# Altium footprint library HIL_project.PcbLib: 26 footprints (part 2 of 2)
Each footprint in its own frame and in the unit in brackets; x right, y up, seen from the top. Pads: shape width x height; smd on the part's side, far side on the other; paste and mask are expansions set on the pad; w line width, h text height; cw(c..) or ccw(c..) is an arc to the next point about the centre after c.
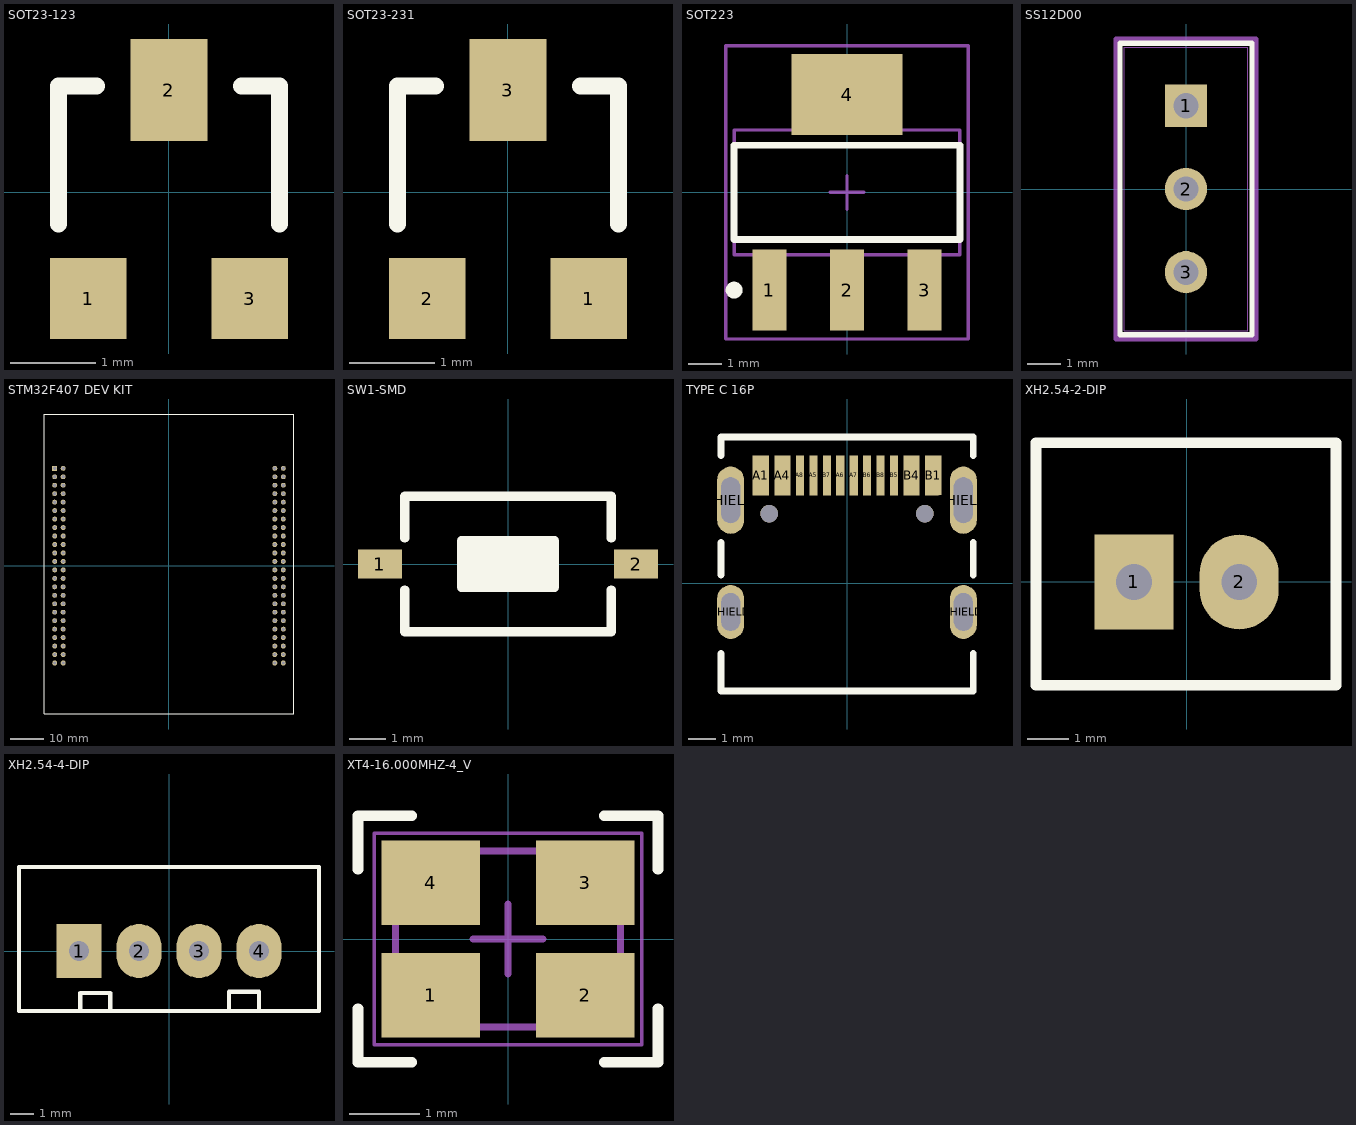
[diagram p1: the footprints below, top view; thin cyan lines are the x and y axes]

## SOT23-123 [mm] "SOT23, 1=bottom-left, 2=top, 3=bottom-right"
height 1.1
pads (3):
  rect 0.9x0.95 smd: 1(-0.95,-1.25) 3(0.95,-1.25)
  rect 0.9x1.2 smd: 2(0,1.2)
Top Overlay:
  lines w0.2: -1.3,-0.375 -1.3,1.25 -0.85,1.25 ; 0.85,1.25 1.3,1.25 1.3,-0.375
3D body "SW3DPS-SOT-23-DEFAULT.STEP": height 1.15, standoff 0.05, extent -1.524,-1.23 1.476,1.27

## SOT23-231 [mm]
height 1.1
pads (3):
  rect 0.9x0.95 smd mask+0: 1(0.95,-1.25)
  rect 0.9x0.95 smd: 2(-0.95,-1.25)
  rect 0.9x1.2 smd: 3(0,1.2)
Top Overlay:
  lines w0.2: -1.3,-0.375 -1.3,1.25 -0.85,1.25 ; 0.85,1.25 1.3,1.25 1.3,-0.375
3D body "SW3DPS-SOT-23-DEFAULT.STEP": height 1.15, standoff 0.05, extent -1.524,-1.23 1.476,1.27

## SOT223 [mm]
pads (4):
  rect 1x2.4 smd: 1(-2.3,-2.9) 2(0,-2.9) 3(2.3,-2.9)
  rect 3.3x2.4 smd: 4(0,2.9)
Top Overlay:
  circle w0.25: c-3.35,-2.9 r0.125
  lines w0.2: -3.35,-1.4 3.35,-1.4 3.35,1.4 -3.35,1.4 -3.35,-1.4
Mechanical 13:
  lines w0.1: -3.35,-1.85 3.35,-1.85 3.35,1.85 -3.35,1.85 -3.35,-1.85
Mechanical 15:
  lines w0.1: -0.5,0 0.5,0 ; 0,-0.5 0,0.5 ; -3.6,-4.35 3.6,-4.35 3.6,4.35 -3.6,4.35 -3.6,-4.35
3D body "SW3DPS-SOT-223-DEFAULT.step": height 1.68, standoff 0, extent -3.25,-3.556 3.25,3.404

## SS12D00 [mil]
pads (3):
  rect 50x50 hole 30 paste-99999 mask+0: 1(0,98.43)
  round 50 hole 30 paste-99999 mask+0: 2(0,0) 3(0,-98.43)
Top Overlay:
  lines w6: -78,-172.5 -78,172.5 78,172.5 78,-172.5 -78,-172.5
Mechanical 13:
  lines w1: -73,-167.5 -73,167.5 73,167.5 73,-167.5 -73,-167.5
Mechanical 15:
  lines w6: -83,-177.5 -83,177.5 83,177.5 83,-177.5 -83,-177.5
3D body "SPDT slide switch SS12D00.step": height 244.52, standoff -135.56, extent -68.9,-167.32 68.9,167.32

## STM32F407 DEV KIT [mm]
pads (96):
  rect 1.478x1.478 hole 0.97: 1(-34.29,29.21)
  round 1.478 hole 0.97: 2(-31.75,29.21) 3(-34.29,26.67) 4(-31.75,26.67) 5(-34.29,24.13) 6(-31.75,24.13) 7(-34.29,21.59) 8(-31.75,21.59) 9(-34.29,19.05) 10(-31.75,19.05) 11(-34.29,16.51) 12(-31.75,16.51) 13(-34.29,13.97) 14(-31.75,13.97) 15(-34.29,11.43) 16(-31.75,11.43) 17(-34.29,8.89) 18(-31.75,8.89) 19(-34.29,6.35) 20(-31.75,6.35) 21(-34.29,3.81) 22(-31.75,3.81) 23(-34.29,1.27) 24(-31.75,1.27) 25(-34.29,-1.27) 26(-31.75,-1.27) 27(-34.29,-3.81) 28(-31.75,-3.81) 29(-34.29,-6.35) 30(-31.75,-6.35) 31(-34.29,-8.89) 32(-31.75,-8.89) 33(-34.29,-11.43) 34(-31.75,-11.43) 35(-34.29,-13.97) 36(-31.75,-13.97) 37(-34.29,-16.51) 38(-31.75,-16.51) 39(-34.29,-19.05) 40(-31.75,-19.05) 41(-34.29,-21.59) 42(-31.75,-21.59) 43(-34.29,-24.13) 44(-31.75,-24.13) 45(-34.29,-26.67) 46(-31.75,-26.67) 47(-34.29,-29.21) 48(-31.75,-29.21) 49(31.75,29.21) 50(34.29,29.21) 51(31.75,26.67) 52(34.29,26.67) 53(31.75,24.13) 54(34.29,24.13) 55(31.75,21.59) 56(34.29,21.59) 57(31.75,19.05) 58(34.29,19.05) 59(31.75,16.51) 60(34.29,16.51) 61(31.75,13.97) 62(34.29,13.97) 63(31.75,11.43) 64(34.29,11.43) 65(31.75,8.89) 66(34.29,8.89) 67(31.75,6.35) 68(34.29,6.35) 69(31.75,3.81) 70(34.29,3.81) 71(31.75,1.27) 72(34.29,1.27) 73(31.75,-1.27) 74(34.29,-1.27) 75(31.75,-3.81) 76(34.29,-3.81) 77(31.75,-6.35) 78(34.29,-6.35) 79(31.75,-8.89) 80(34.29,-8.89) 81(31.75,-11.43) 82(34.29,-11.43) 83(31.75,-13.97) 84(34.29,-13.97) 85(31.75,-16.51) 86(34.29,-16.51) 87(31.75,-19.05) 88(34.29,-19.05) 89(31.75,-21.59) 90(34.29,-21.59) 91(31.75,-24.13) 92(34.29,-24.13) 93(31.75,-26.67) 94(34.29,-26.67) 95(31.75,-29.21) 96(34.29,-29.21)
Top Overlay:
  lines w0.15: -37.5,-44.5 -37.5,45.5 37.5,45.5 37.5,-44.5 -37.5,-44.5
3D body "step_temp.STEP": height 8.51, standoff -3.56, extent 29.97,-30.48 36.07,30.48
3D body "step_temp.STEP": height 8.51, standoff -3.56, extent -36.07,-30.48 -29.97,30.48
3D body "STM32F407ZGT6.STEP": height 14.2, standoff 2, extent -36.25,-42.55 36.25,44.05

## SW1-SMD [mm]
pads (2):
  rect 1.2x0.8 smd: 1(-3.5,0) 2(3.5,0)
Top Overlay:
  rectangle: -1.27,-0.635 1.27,0.635
  lines w0.254: -2.819,-0.711 -2.819,-1.854 2.819,-1.854 2.819,-0.711 ; -2.819,0.711 -2.819,1.854 2.819,1.854 2.819,0.711 ; -1.27,-0.635 -1.27,0.635 1.27,0.635 1.27,-0.635 -1.27,-0.635
3D body "User Library-Button-SMD.step": height 2.5, standoff 0, extent -3.05,-1.85 3.05,1.85

## TYPE C 16P [mm]
pads (18):
  rect 0.6x1.5 smd: A1(-3.202,4) A4(-2.402,4) B1(3.198,4) B4(2.398,4)
  rect 0.3x1.5 smd: A5(-1.252,4) A6(-0.252,4) A7(0.248,4) A8(-1.752,4) B5(1.748,4) B6(0.748,4) B7(-0.752,4) B8(1.248,4)
  oval 1x2 hole 0.7 slot 1.4 at 90 deg: SHIELD(-4.322,-1.067) SHIELD(4.318,-1.067)
  oval 1x2.5 hole 0.7 slot 1.7 at 90 deg: SHIELD(-4.322,3.083) SHIELD(4.318,3.083)
  round 0.65 hole 0.65 mask+0.102: SHIELD(-2.892,2.583) SHIELD(2.888,2.583)
Top Overlay:
  lines w0.254: -4.678,-2.614 -4.678,-4.003 4.688,-4.003 4.688,-2.614 ; -4.678,0.3 -4.678,1.514 ; -4.678,4.746 -4.678,5.43 4.688,5.43 4.688,4.746 ; 4.688,0.3 4.688,1.514
3D body "Type-C 16P.STEP": height 3.21, standoff -1, extent -4.47,-3.65 4.47,4.25

## XH2.54-2-DIP [mil] "CON2"
height 200
pads (2):
  rect 75x90 hole 34: 1(-50,0)
  oval 75x90 hole 34: 2(50,0)
Top Overlay:
  lines w10: -143,-98 -143,132 142,132 142,-98 -143,-98
3D body "JST - XH - Thru V - 2Pin - 2.54mm.stp": height 284, standoff -118, extent -142.39,-98 141.61,132

## XH2.54-4-DIP [mil] "CON4"
height 200
pads (4):
  rect 75x90 hole 34: 1(-150,0)
  oval 75x90 hole 34: 2(-50,0) 3(50,0) 4(150,0)
Top Overlay:
  lines w7: -148,-100 -148,-70 -98,-70 -98,-100 ; 100,-98 100,-68 150,-68 150,-98 ; -250,-100 -250,140 250,140 250,0 250,-100 -250,-100
3D body "User Library-XH2_54-4P_step.step": height 275.59, standoff -70.87, extent -241.97,-90.99 250.16,137.36

## XT4-16.000MHZ-4_V [mm] "Hand Drawn, 4-Leads, Body 3.2x2.5 mm"
height 0.9
pads (4):
  rect 1.4x1.2 smd: 1(-1.1,-0.8) 2(1.1,-0.8) 3(1.1,0.8) 4(-1.1,0.8)
Top Overlay:
  lines w0.15: -2.132,-0.989 -2.132,-1.751 -1.37,-1.751 ; -2.132,0.989 -2.132,1.751 -1.37,1.751 ; 1.37,-1.751 2.132,-1.751 2.132,-0.989 ; 1.37,1.751 2.132,1.751 2.132,0.989
Mechanical 13:
  lines w0.1: -1.6,-1.25 1.6,-1.25 1.6,1.25 -1.6,1.25 -1.6,-1.25
Mechanical 15:
  lines w0.05: -1.9,-1.5 1.9,-1.5 1.9,1.5 -1.9,1.5 -1.9,-1.5
  lines w0.1: -0.5,0 0.5,0 ; 0,-0.5 0,0.5
3D body "3225 SMD Crystal Oscillator.STEP": height 0.65, standoff -0.05, extent -1.6,-1.25 1.6,1.25